# Altium schematic symbol library EMX4T2R.SchLib: 1 symbol
Pins are listed as number, name and electrical type; pins without a type are passive.

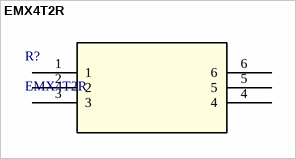
[diagram p0: symbol EMX4T2R]

## EMX4T2R
designator R?
Description; Manufacturer_Name: ROHM Semiconductor; Copyright: Copyright (C) 2026 Ultra Librarian. All rights reserved.; Manufacturer_Part_Number: EMX4T2R; RefDes: RefDes; Type: Type
footprint TRANS_EM6_ROM
pins: 1, 2, 3, 4, 5, 6